# EAGLE library part SC7538-08UTG (library SC7538-08UTG)
ESD Suppressors / TVS Diodes 5V 3A +30/-22kV uDFN3810-9L Diode array AEC-Q101 Source: Datasheet <https://www.littelfuse.com/media?resourcetype=datasheets&itemid=59382b8d-537a-4c7e-9d68-ddc6a1cc92ed&filename=littelfuse-tvs-diode-array-sc7538-08utg-datasheet>
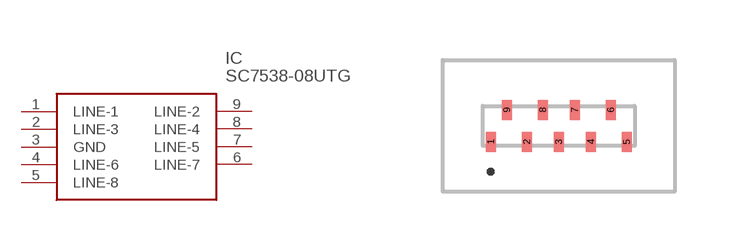
[diagram p0: symbol with the pads of SC753808UTG; footprint SC753808UTG]

Designator prefix IC

## SC7538-08UTG (Description: ESD Suppressors / TVS Diodes 5V 3A +30/-22kV uDFN3810-9L Diode array AEC-Q101; Height: 0.55mm; Manufacturer_Name: LITTELFUSE; Manufacturer_Part_Number: SC7538-08UTG; Mouser_Part_Number: 576-SC7538-08UTG; Mouser_Price-Stock: https://www.mouser.co.uk/ProductDetail/Littelfuse/SC7538-08UTG?qs=Li%252BoUPsLEnt7O3OzEjruww%3D%3D)  [SC753808UTG]
1  LINE-1
2  LINE-3
3  GND
4  LINE-6
5  LINE-8
6  LINE-7
7  LINE-5
8  LINE-4
9  LINE-2

## Footprint SC753808UTG (pad centres in mm)
SC7538-08UTG-2
smd 0.25 x 0.5: 1 -1.7,-0.4; 2 -0.8,-0.4; 3 0,-0.4; 4 0.8,-0.4; 5 1.7,-0.4; 6 1.3,0.4; 7 0.4,0.4; 8 -0.4,0.4; 9 -1.3,0.4